# Altium footprint library JST_SM04B-GHS-TB.PcbLib: 1 footprints
Each footprint in its own frame and in the unit in brackets; x right, y up, seen from the top. Pads: shape width x height; smd on the part's side, far side on the other; paste and mask are expansions set on the pad; w line width, h text height; cw(c..) or ccw(c..) is an arc to the next point about the centre after c.
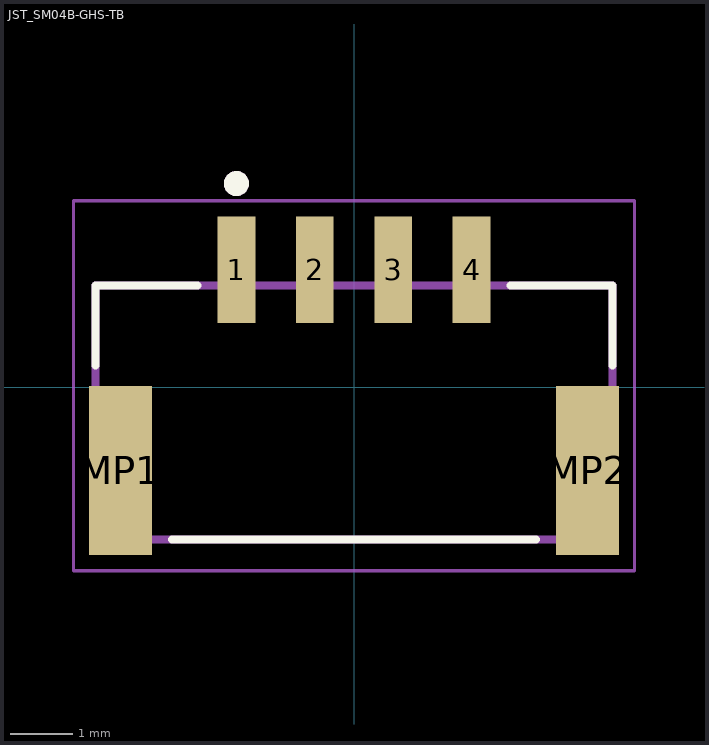
[diagram p0: the footprint, top view; thin cyan lines are the x and y axes]

## JST_SM04B-GHS-TB [mm]
pads (6):
  rect 0.6x1.7 smd paste+0 mask+0.102: 1(-1.875,1.875) 2(-0.625,1.875) 3(0.625,1.875) 4(1.875,1.875)
  rect 1x2.7 smd paste+0 mask+0.102: MP1(-3.725,-1.325) MP2(3.725,-1.325)
Top Overlay:
  circle w0.2: c-1.875,3.25 r0.1
  lines w0.127: -4.125,0.345 -4.125,1.625 -2.495,1.625 ; -2.905,-2.425 2.905,-2.425 ; 2.495,1.625 4.125,1.625 4.125,0.345
Assembly Top:
  circle w0.2: c-1.875,3.25 r0.1
  lines w0.127: -4.125,-2.425 -4.125,1.625 4.125,1.625 4.125,-2.425 -4.125,-2.425
Courtyard Top:
  lines w0.05: -4.475,-2.925 -4.475,2.975 4.475,2.975 4.475,-2.925 -4.475,-2.925
3D body "step_temp.STEP": height 4.25, standoff 0, extent -4.125,-2.048 4.125,2.802